# Altium footprint library Connectors.PcbLib: 320 footprints (part 10 of 20)
Each footprint in its own frame and in the unit in brackets; x right, y up, seen from the top. Pads: shape width x height; smd on the part's side, far side on the other; paste and mask are expansions set on the pad; w line width, h text height; cw(c..) or ccw(c..) is an arc to the next point about the centre after c.
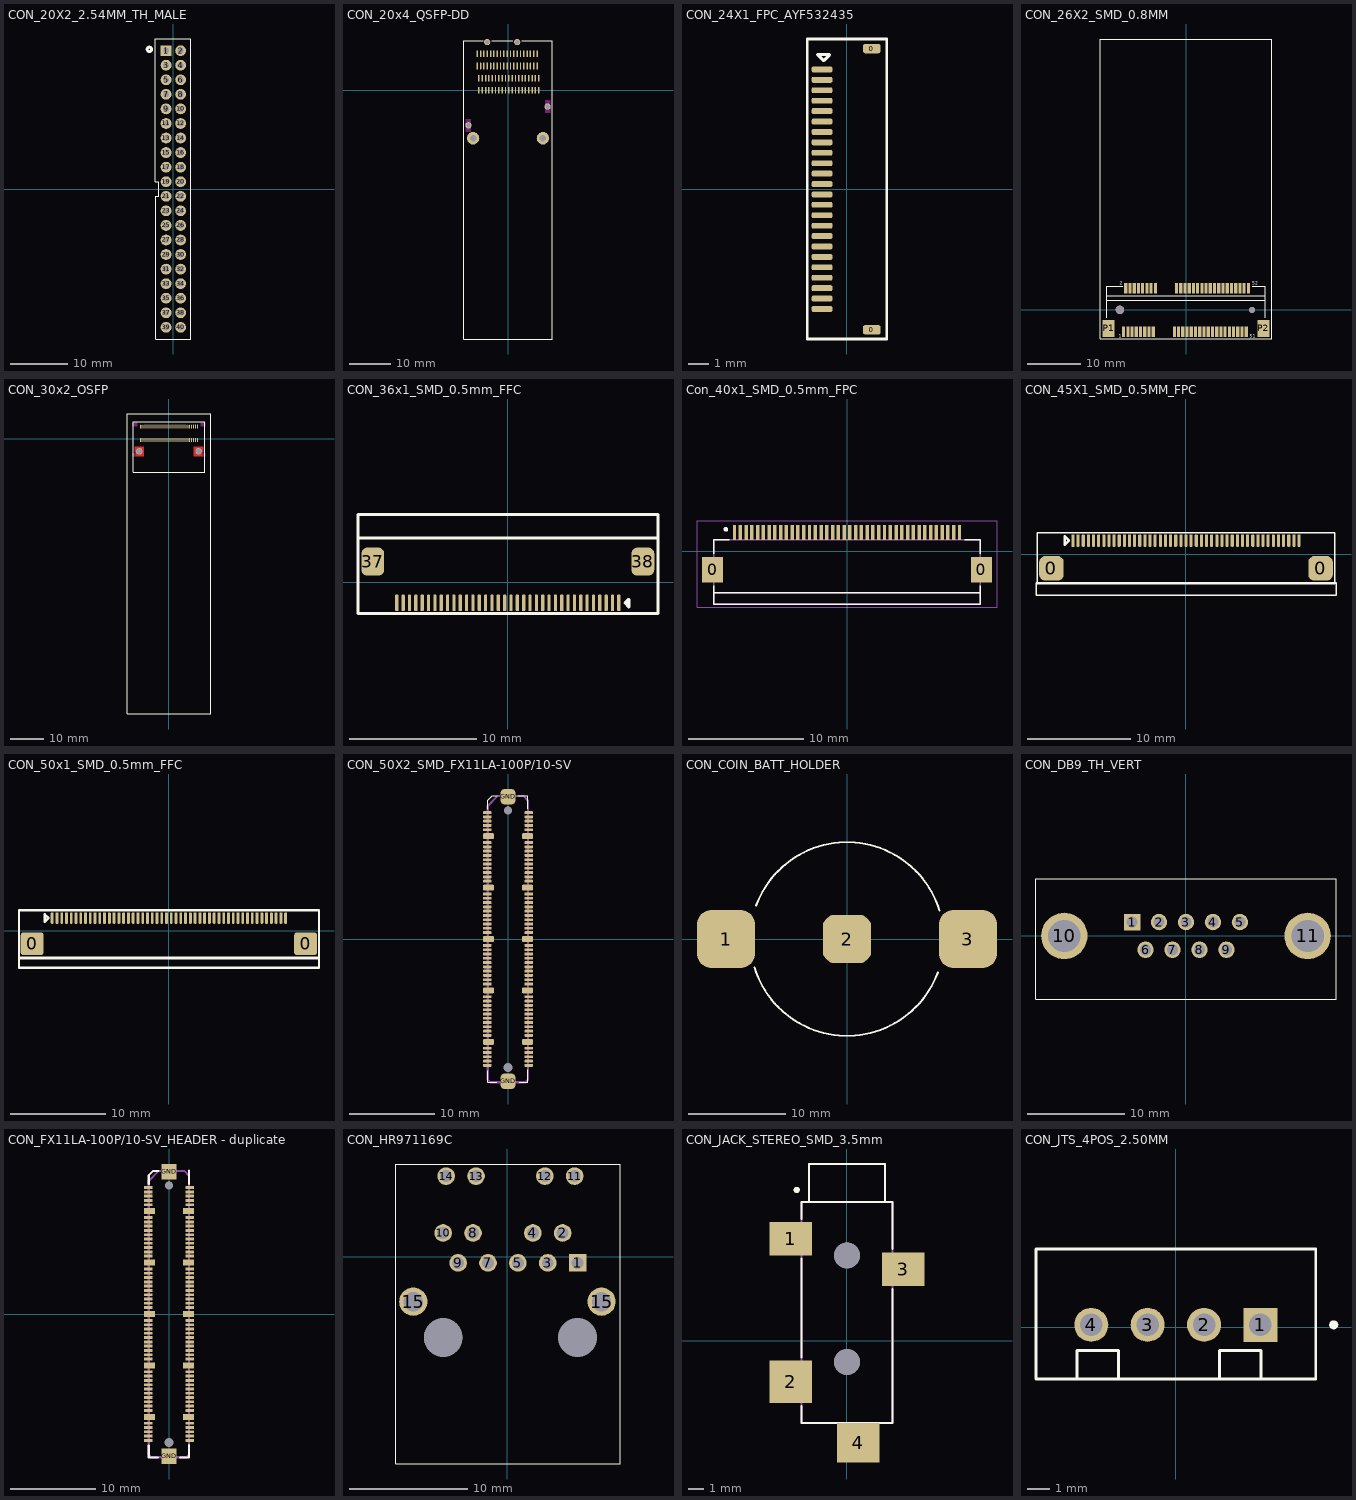
[diagram p9: the footprints below, top view; thin cyan lines are the x and y axes]

## CON_20X2_2.54MM_TH_MALE [mil] "/20230220/N-A.Potosi"
pads (40):
  rect 74x74 hole 40: 1(-50,950)
  round 74 / inner round 0 / far side round 74 hole 40: 2(50,950) 3(-50,850) 4(50,850) 5(-50,750) 6(50,750) 7(-50,650) 8(50,650) 9(-50,550) 10(50,550) 11(-50,450) 12(50,450) 13(-50,350) 14(50,350) 15(-50,250) 16(50,250) 17(-50,150) 18(50,150) 19(-50,50) 20(50,50) 21(-50,-50) 22(50,-50) 23(-50,-150) 24(50,-150) 25(-50,-250) 26(50,-250) 27(-50,-350) 28(50,-350) 29(-50,-450) 30(50,-450) 31(-50,-550) 32(50,-550) 33(-50,-650) 34(50,-650) 35(-50,-750) 36(50,-750) 37(-50,-850) 38(50,-850) 39(-50,-950) 40(50,-950)
Top Overlay:
  circle w20: c-164.54,958.83 r15
  lines w5: -125,50 -100,50 -100,-50 -120,-50 -120,-1030 120,-1030 120,1030 -125,1030 -125,50
Bottom Overlay:
  circle w20: c-164.54,958.83 r15
3D body "20X2HDR61204021621_Download_STP_61204021621_rev1.stp": height 351.38, standoff -125, extent -174.22,-1150.79 187,1150.78

## CON_20x4_QSFP-DD [mm] "/20220601/V-A.Patino"
pads (82):
  rrect50% 0.35x1.6 smd: 1(-7,-0.05) 2(-6.2,-0.05) 3(-5.4,-0.05) 4(-4.6,-0.05) 5(-3.8,-0.05) 6(-3,-0.05) 7(-2.2,-0.05) 8(-1.4,-0.05) 9(-0.6,-0.05) 10(0.2,-0.05) 11(1,-0.05) 12(1.8,-0.05) 13(2.6,-0.05) 14(3.4,-0.05) 15(4.2,-0.05) 16(5,-0.05) 17(5.8,-0.05) 18(6.6,-0.05) 19(7.4,-0.05) 20(7,8.74) 21(6.2,8.74) 22(5.4,8.74) 23(4.6,8.74) 24(3.8,8.74) 25(3,8.74) 26(2.2,8.74) 27(1.4,8.74) 28(0.6,8.74) 29(-0.2,8.74) 30(-1,8.74) 31(-1.8,8.74) 32(-2.6,8.74) 33(-3.4,8.74) 34(-4.2,8.74) 35(-5,8.74) 36(-5.8,8.74) 37(-6.6,8.74) 38(-7.4,8.74) 39(-7,2.88) 40(-6.2,2.88) 41(-5.4,2.88) 42(-4.6,2.88) 43(-3.8,2.88) 44(-3,2.88) 45(-2.2,2.88) 46(-1.4,2.88) 47(-0.6,2.88) 48(0.2,2.88) 49(1,2.88) 50(1.8,2.88) 51(2.6,2.88) 52(3.4,2.88) 53(4.2,2.88) 54(5,2.88) 55(5.8,2.88) 56(6.6,2.88) 57(7.4,2.88) 58(7,5.81) 59(6.2,5.81) 60(5.4,5.81) 61(4.6,5.81) 62(3.8,5.81) 63(3,5.81) 64(2.2,5.81) 65(1.4,5.81) 66(0.6,5.81) 67(-0.2,5.81) 68(-1,5.81) 69(-1.8,5.81) 70(-2.6,5.81) 71(-3.4,5.81) 72(-4.2,5.81) 73(-5,5.81) 74(-5.8,5.81) 75(-6.6,5.81) 76(-7.4,5.81)
  round 1.5 hole 1.05: ""(-9.5,-8.45) ""(-5,11.55) ""(2.2,11.55) ""(9.5,-3.95)
  round 3 hole 1.55 unplated: ""(-8.4,-11.55) ""(8.4,-11.55)
Top Overlay:
  lines w0.127: -5.975,11.9 -10.6,11.9 -10.6,-59.8 10.6,-59.8 10.6,11.9 3.312,11.9 ; -3.888,11.9 1.087,11.9
Keep-Out Layer:
  region: 10.1,-5.45 10.1,-2.45 8.9,-2.45 8.9,-5.45
  region: -10.1,-9.95 -10.1,-6.95 -8.9,-6.95 -8.9,-9.95
3D body "M-UE36-A1070-X000T_REVTF.STEP": height 7.91, standoff -0.94, extent -9.4,-13.975 9.4,9.975
3D body "c-2342933-1-b-3d.stp": height 12.7, standoff -2.34, extent -10.601,-59.765 10.601,11.9

## CON_24X1_FPC_AYF532435 [mil] "/20200625/N-A.Potosi"
pads (26):
  rrect50% 33.46x17.72 smd: 0(47.03,-265.75) 0(47.03,265.75)
  rrect50% 39x11 smd: 1(-47.03,226.38) 2(-47.03,206.69) 3(-47.03,187.01) 4(-47.03,167.32) 5(-47.03,147.64) 6(-47.03,127.95) 7(-47.03,108.27) 8(-47.03,88.58) 9(-47.03,68.9) 10(-47.03,49.21) 11(-47.03,29.53) 12(-47.03,9.84) 13(-47.03,-9.84) 14(-47.03,-29.53) 15(-47.03,-49.21) 16(-47.03,-68.9) 17(-47.03,-88.58) 18(-47.03,-108.27) 19(-47.03,-127.95) 20(-47.03,-147.64) 21(-47.03,-167.32) 22(-47.03,-187.01) 23(-47.03,-206.69) 24(-47.03,-226.38)
Top Overlay:
  lines w5: -74.7,-283.1 -74.7,283.92 75.02,283.92 75.02,-283.1 -74.7,-283.1
  lines w6: -55.39,254.43 -32.76,254.43 -44.07,243.11 -55.39,254.43
3D body "ayf532435-closed.step": height 39.87, standoff 0.5, extent -73.6,-276.57 72.07,274.61

## CON_26X2_SMD_0.8MM [mm] "/20210224/J-E.Pachon"
pads (56):
  rect 0.6x2 smd: 1(-11.8,-4.1) 2(-11.4,4.1) 3(-11,-4.1) 4(-10.6,4.1) 5(-10.2,-4.1) 6(-9.8,4.1) 7(-9.4,-4.1) 8(-9,4.1) 9(-8.6,-4.1) 10(-8.2,4.1) 11(-7.8,-4.1) 12(-7.4,4.1) 13(-7,-4.1) 14(-6.6,4.1) 15(-6.2,-4.1) 16(-5.8,4.1) 17(-2.2,-4.1) 18(-1.8,4.1) 19(-1.4,-4.1) 20(-1,4.1) 21(-0.6,-4.1) 22(-0.2,4.1) 23(0.2,-4.1) 24(0.6,4.1) 25(1,-4.1) 26(1.4,4.1) 27(1.8,-4.1) 28(2.2,4.1) 29(2.6,-4.1) 30(3,4.1) 31(3.4,-4.1) 32(3.8,4.1) 33(4.2,-4.1) 34(4.6,4.1) 35(5,-4.1) 36(5.4,4.1) 37(5.8,-4.1) 38(6.2,4.1) 39(6.6,-4.1) 40(7,4.1) 41(7.4,-4.1) 42(7.8,4.1) 43(8.2,-4.1) 44(8.6,4.1) 45(9,-4.1) 46(9.4,4.1) 47(9.8,-4.1) 48(10.2,4.1) 49(10.6,-4.1) 50(11,4.1) 51(11.4,-4.1) 52(11.8,4.1)
  rect 2.3x3.2 smd: P1(-14.65,-3.5) P2(14.65,-3.5)
  round 1.6 hole 1.6 unplated: ""(-12.5,0)
  round 1.1 hole 1.1 unplated: ""(12.5,0)
Top Overlay:
  lines w0.127: -16.252,-5.503 16.248,-5.503 16.248,51.247 -16.252,51.247 -16.252,-5.503
  lines w0.2: -15,-1.5 -15,4.5 -12,4.5 ; -15,1.86 15,1.86 ; -15,2.71 15,2.71 ; 12.5,4.5 15,4.5 15,-1.5
  text "1" at -12.752,-5.251 h0.61
  text "51" at 12.013,-5.256 h0.61
  text "52" at 12.518,4.757 h0.61
  text "2" at -12.519,4.757 h0.61
3D body "1775862-2.stp": height 5.16, standoff -0.69, extent -14.95,-4.57 14.95,4.51

## CON_30x2_OSFP [mm] "/20220602/V-A.Patino"
pads (62):
  rrect50% 0.3x1.2 smd: 1(-8.7,-0.275) 2(-8.1,-0.275) 3(-7.5,-0.275) 4(-6.9,-0.275) 5(-6.3,-0.275) 6(-5.7,-0.275) 7(-5.1,-0.275) 8(-4.5,-0.275) 9(-3.9,-0.275) 10(-3.3,-0.275) 11(-2.7,-0.275) 12(-2.1,-0.275) 13(-1.5,-0.275) 14(-0.9,-0.275) 15(-0.3,-0.275) 16(0.3,-0.275) 17(0.9,-0.275) 18(1.5,-0.275) 19(2.1,-0.275) 20(2.7,-0.275) 21(3.3,-0.275) 22(3.9,-0.275) 23(4.5,-0.275) 24(5.1,-0.275) 25(5.7,-0.275) 26(6.3,-0.275) 27(6.9,-0.275) 28(7.5,-0.275) 29(8.1,-0.275) 30(8.7,-0.275) 31(8.7,3.725) 32(8.1,3.725) 33(7.5,3.725) 34(6.9,3.725) 35(6.3,3.725) 36(5.7,3.725) 37(5.1,3.725) 38(4.5,3.725) 39(3.9,3.725) 40(3.3,3.725) 41(2.7,3.725) 42(2.1,3.725) 43(1.5,3.725) 44(0.9,3.725) 45(0.3,3.725) 46(-0.3,3.725) 47(-0.9,3.725) 48(-1.5,3.725) 49(-2.1,3.725) 50(-2.7,3.725) 51(-3.3,3.725) 52(-3.9,3.725) 53(-4.5,3.725) 54(-5.1,3.725) 55(-5.7,3.725) 56(-6.3,3.725) 57(-6.9,3.725) 58(-7.5,3.725) 59(-8.1,3.725) 60(-8.7,3.725)
  round 1.9 hole 1.651 unplated: ""(-9,-3.725) ""(9,-3.725)
Top Layer:
  region: 10.425,-2.395 7.575,-2.395 7.575,-5.245 10.025,-5.245 10.025,-4.266 10.032,-4.259 10.035,-4.227 10.06,-4.168 10.105,-4.123 10.164,-4.098 10.196,-4.095 10.425,-4.095
  region: -10.425,-2.395 -7.575,-2.395 -7.575,-5.245 -10.025,-5.245 -10.025,-4.266 -10.032,-4.259 -10.035,-4.227 -10.06,-4.168 -10.105,-4.123 -10.164,-4.098 -10.196,-4.095 -10.425,-4.095
Top Overlay:
  lines w0.152: -12.6,-83.372 -12.6,7.572 12.628,7.572 12.628,-83.372 -12.6,-83.372 ; -10.8,-10.075 -10.8,5.185 10.8,5.185 10.8,-10.075 -10.8,-10.075
Keep-Out Layer:
  rectangle: 9.52,3.735 11.03,4.935
  rectangle: 10.125,-5.315 11.025,-4.215
  rectangle: -11.025,-5.315 -10.125,-4.215
  rectangle: -11.03,3.735 -9.52,4.935
3D body "M-UE62-B1620-02021-REVT1.STEP": height 15.56, standoff -2.24, extent -12.633,-83.42 12.633,7.58
3D body "c-2324869-2-1-3d.stp": height 8.41, standoff -1.04, extent -10.8,-10.075 10.8,5.185

## CON_36x1_SMD_0.5mm_FFC [mil] "/ 20220629/ F-A.Ospina"
height 78.74
pads (38):
  rrect50% 10x51 smd: 1(344.49,-64) 2(324.8,-64) 3(305.12,-64) 4(285.43,-64) 5(265.75,-64) 6(246.06,-64) 7(226.38,-64) 8(206.69,-64) 9(187.01,-64) 10(167.32,-64) 11(147.64,-64) 12(127.95,-64) 13(108.27,-64) 14(88.58,-64) 15(68.9,-64) 16(49.21,-64) 17(29.53,-64) 18(9.84,-64) 19(-9.84,-64) 20(-29.53,-64) 21(-49.21,-64) 22(-68.9,-64) 23(-88.58,-64) 24(-108.27,-64) 25(-127.95,-64) 26(-147.64,-64) 27(-167.32,-64) 28(-187.01,-64) 29(-206.69,-64) 30(-226.38,-64) 31(-246.06,-64) 32(-265.75,-64) 33(-285.43,-64) 34(-305.12,-64) 35(-324.8,-64)
  rrect50% 10x50.98 smd: 36(-344.49,-64)
  rrect50% 71x87 smd: 37(-419,64) 38(419,64)
Top Overlay:
  lines w10: -464.93,137.06 -227.36,137.06 ; -230.52,137.06 234.24,137.01 466.03,137.01 ; -464.93,-96.88 465.77,-96.88 465.77,210.2 -464.93,210.2 -464.93,-96.88 ; 363.62,-64.13 375.43,-53.46 375.43,-76.45 363.62,-64.13
3D body "FH12A-36S-0.5SH.stp": height 79.53, standoff -5.42, extent -443.4,-76.47 442.46,199.12

## Con_40x1_SMD_0.5mm_FPC [mm] "/20230904/J-E.Pachon"
pads (42):
  rect 1.8x2.2 smd: 0(-11.65,-1.625) 0(11.65,-1.625)
  rect 0.3x1.3 smd: 1(-9.75,1.625) 2(-9.25,1.625) 3(-8.75,1.625) 4(-8.25,1.625) 5(-7.75,1.625) 6(-7.25,1.625) 7(-6.75,1.625) 8(-6.25,1.625) 9(-5.75,1.625) 10(-5.25,1.625) 11(-4.75,1.625) 12(-4.25,1.625) 13(-3.75,1.625) 14(-3.25,1.625) 15(-2.75,1.625) 16(-2.25,1.625) 17(-1.75,1.625) 18(-1.25,1.625) 19(-0.75,1.625) 20(-0.25,1.625) 21(0.25,1.625) 22(0.75,1.625) 23(1.25,1.625) 24(1.75,1.625) 25(2.25,1.625) 26(2.75,1.625) 27(3.25,1.625) 28(3.75,1.625) 29(4.25,1.625) 30(4.75,1.625) 31(5.25,1.625) 32(5.75,1.625) 33(6.25,1.625) 34(6.75,1.625) 35(7.25,1.625) 36(7.75,1.625) 37(8.25,1.625) 38(8.75,1.625) 39(9.25,1.625) 40(9.75,1.625)
Top Overlay:
  circle w0.2: c-10.5,1.875 r0.1
  lines w0.127: -11.55,-3.025 -11.55,-3.625 ; -11.55,-0.225 -11.55,0.975 -10.2,0.975 ; 10.2,0.975 11.55,0.975 11.55,-0.225 ; 11.55,-3.025 11.55,-3.625 ; -11.55,-3.625 -11.55,-4.625 11.55,-4.625 11.55,-3.625 ; -11.55,-3.625 11.55,-3.625
Top 3D Body (Mech13):
  lines w0.127: -11.55,-3.625 -11.55,-4.625 11.55,-4.625 11.55,-3.625 ; -11.55,-3.625 -11.55,0.975 11.55,0.975 11.55,-3.625 ; -11.55,-3.625 11.55,-3.625
Mechanical 15:
  lines w0.05: -13,-4.875 13,-4.875 13,2.625 -13,2.625 -13,-4.875
3D body "step_temp.STEP": height 2.2, standoff 0, extent -12.05,-4.625 12.05,1.775

## CON_45X1_SMD_0.5MM_FPC [mm] "/ 20200724 / N-A.Potosi"
pads (47):
  rrect50% 2.4x2.4 smd: 0(-13.1,-1.35) 0(13.1,-1.35)
  rect 0.3x1.2 smd: 1(-11,1.35)
  rrect50% 0.3x1.2 smd: 2(-10.5,1.35) 3(-10,1.35) 4(-9.5,1.35) 5(-9,1.35) 6(-8.5,1.35) 7(-8,1.35) 8(-7.5,1.35) 9(-7,1.35) 10(-6.5,1.35) 11(-6,1.35) 12(-5.5,1.35) 13(-5,1.35) 14(-4.5,1.35) 15(-4,1.35) 16(-3.5,1.35) 17(-3,1.35) 18(-2.5,1.35) 19(-2,1.35) 20(-1.5,1.35) 21(-1,1.35) 22(-0.5,1.35) 23(0,1.35) 24(0.5,1.35) 25(1,1.35) 26(1.5,1.35) 27(2,1.35) 28(2.5,1.35) 29(3,1.35) 30(3.5,1.35) 31(4,1.35) 32(4.5,1.35) 33(5,1.35) 34(5.5,1.35) 35(6,1.35) 36(6.5,1.35) 37(7,1.35) 38(7.5,1.35) 39(8,1.35) 40(8.5,1.35) 41(9,1.35) 42(9.5,1.35) 43(10,1.35) 44(10.5,1.35) 45(11,1.35)
Top Overlay:
  lines w0.127: -14.6,-3.95 -14.6,-2.75 14.6,-2.75 14.6,-3.95 -14.6,-3.95 ; -14.5,-2.84 -14.5,2.094 14.5,2.094 14.5,-2.84 -14.5,-2.84
  lines w0.254: -11.8,0.95 -11.4,1.35 -11.8,1.75 -11.8,0.95
3D body "s62684_451100alf.stp": height 2.11, standoff 0.05, extent -14,-3.97 14,1.67

## CON_50x1_SMD_0.5mm_FFC [mm] "/ 20200923 / V-A.Patino"
height 2
pads (52):
  rrect25% 2.4x2.4 smd: 0(-14.35,-1.35) 0(14.35,-1.35)
  rrect50% 0.3x1.2 smd mask+0.05: 1(-12.25,1.35) 2(-11.75,1.35) 3(-11.25,1.35) 4(-10.75,1.35) 5(-10.25,1.35) 6(-9.75,1.35) 7(-9.25,1.35) 8(-8.75,1.35) 9(-8.25,1.35) 10(-7.75,1.35) 11(-7.25,1.35) 12(-6.75,1.35) 13(-6.25,1.35) 14(-5.75,1.35) 15(-5.25,1.35) 16(-4.75,1.35) 17(-4.25,1.35) 18(-3.75,1.35) 19(-3.25,1.35) 20(-2.75,1.35) 21(-2.25,1.35) 22(-1.75,1.35) 23(-1.25,1.35) 24(-0.75,1.35) 25(-0.25,1.35) 26(0.25,1.35) 27(0.75,1.35) 28(1.25,1.35) 29(1.75,1.35) 30(2.25,1.35) 31(2.75,1.35) 32(3.25,1.35) 33(3.75,1.35) 34(4.25,1.35) 35(4.75,1.35) 36(5.25,1.35) 37(5.75,1.35) 38(6.25,1.35) 39(6.75,1.35) 40(7.25,1.35) 41(7.75,1.35) 42(8.25,1.35) 43(8.75,1.35) 44(9.25,1.35) 45(9.75,1.35) 46(10.25,1.35) 47(10.75,1.35) 48(11.25,1.35) 49(11.75,1.35) 50(12.25,1.35)
Top Overlay:
  lines w0.254: -15.73,-3.85 15.75,-3.85 15.75,-2.79 -15.73,-2.79 -15.73,-3.85 ; -15.73,-2.89 15.75,-2.89 15.75,2.15 -15.73,2.15 -15.73,-2.89 ; -13.05,0.95 -13.05,1.75 -12.65,1.35 -13.05,0.95
3D body "62684502100alf.stp": height 2, standoff -0.05, extent -15.24,-4.12 15.26,1.48

## CON_50X2_SMD_FX11LA-100P/10-SV [mm] "Hirose Conn/20200714/N-A.Potosi"
pads (114):
  rrect50% 1x0.33 smd: A1(-2.425,14.749) A2(-2.425,14.249) A3(-2.425,13.749) A4(-2.425,13.249) A5(-2.425,12.749) A6(-2.425,11.249) A7(-2.425,10.749) A8(-2.425,10.249) A9(-2.425,9.749) A10(-2.425,9.249) A11(-2.425,8.749) A12(-2.425,8.25) A13(-2.425,7.75) A14(-2.425,7.25) A15(-2.425,6.75) A16(-2.425,5.25) A17(-2.425,4.75) A18(-2.425,4.25) A19(-2.425,3.75) A20(-2.425,3.25) A21(-2.425,2.75) A22(-2.425,2.251) A23(-2.425,1.751) A24(-2.425,1.251) A25(-2.425,0.751) A26(-2.425,-0.749) A27(-2.425,-1.249) A28(-2.425,-1.749) A29(-2.425,-2.249) A30(-2.425,-2.749) A31(-2.425,-3.249) A32(-2.425,-3.748) A33(-2.425,-4.248) A34(-2.425,-4.748) A35(-2.425,-5.248) A36(-2.425,-6.747) A37(-2.425,-7.247) A38(-2.425,-7.747) A39(-2.425,-8.247) A40(-2.425,-8.747) A41(-2.425,-9.247) A42(-2.425,-9.747) A43(-2.425,-10.247) A44(-2.425,-10.747) A45(-2.425,-11.247) A46(-2.425,-12.747) A47(-2.425,-13.247) A48(-2.425,-13.747) A49(-2.425,-14.247) A50(-2.425,-14.747) B1(2.425,14.749) B2(2.425,14.249) B3(2.425,13.749) B4(2.425,13.249) B5(2.425,12.749) B6(2.425,11.249) B7(2.425,10.749) B8(2.425,10.249) B9(2.425,9.749) B10(2.425,9.249) B11(2.425,8.749) B12(2.425,8.25) B13(2.425,7.75) B14(2.425,7.25) B15(2.425,6.75) B16(2.425,5.251) B17(2.425,4.751) B18(2.425,4.251) B19(2.425,3.751) B20(2.425,3.251) B21(2.425,2.751) B22(2.425,2.251) B23(2.425,1.751) B24(2.425,1.251) B25(2.425,0.751) B26(2.425,-0.748) B27(2.425,-1.248) B28(2.425,-1.748) B29(2.425,-2.248) B30(2.425,-2.748) B31(2.425,-3.248) B32(2.425,-3.748) B33(2.425,-4.248) B34(2.425,-4.748) B35(2.425,-5.248) B36(2.425,-6.747) B37(2.425,-7.247) B38(2.425,-7.747) B39(2.425,-8.247) B40(2.425,-8.747) B41(2.425,-9.247) B42(2.425,-9.747) B43(2.425,-10.247) B44(2.425,-10.747) B45(2.425,-11.247) B46(2.425,-12.747) B47(2.425,-13.247) B48(2.425,-13.747) B49(2.425,-14.247) B50(2.425,-14.747)
  rrect50% 1.3x0.7 smd: GND(-2.275,-11.997) GND(-2.275,-5.998) GND(-2.275,0.001) GND(-2.275,6) GND(-2.275,11.999) GND(2.275,-11.996) GND(2.275,-5.998) GND(2.275,0.001) GND(2.275,6) GND(2.275,11.999)
  rrect50% 1.7x1.8 smd: GND(0,-16.601) GND(0,16.601)
  round 0.9 hole 1 unplated: ""(0,-14.997)
  round 0.9 hole 0.95 unplated: ""(0,14.999)
Top Overlay:
  lines w0.127: -2.365,-15.35 -2.365,-16.734 -1.29,-16.734 ; -2.365,15.156 -2.365,16.17 -1.835,16.7 -1.245,16.7 ; 1.13,16.709 2.322,16.709 2.322,15.17 ; 1.301,-16.734 2.322,-16.734 2.322,-15.272
Mechanical 1:
  lines w0.251: -2.366,-16.408 -2.366,15.517 -1.183,16.7 1.782,16.7 2.318,16.164 2.318,-16.444 2.04,-16.722 -2.052,-16.722 -2.366,-16.408
3D body "47879.stp": height 1.65, standoff -0.58, extent -2.495,-17.295 2.755,17.305

## CON_COIN_BATT_HOLDER [mm] "/20201001/N-A.Potosi"
pads (3):
  rrect50% 6x6 smd: 1(-12.5,0) 3(12.5,0)
  rrect50% 5x5 smd: 2(0,0)
Top Overlay:
  lines w0.203: -9.565,-2.918 ccw(c0,0) 9.391,-3.437 ; -9.391,3.437 cw(c0,0) 9.565,2.918
3D body "CR2032_closed_battery_BH.step": height 3.97, standoff 0.11, extent -11.625,-10.257 11.625,9.743

## CON_DB9_TH_VERT [mm] "/20220603/F-A.Ospina"
pads (11):
  rect 1.69x1.69 hole 1.143: 1(-5.54,1.42)
  round 1.69 hole 1.143: 2(-2.77,1.42) 3(0,1.42) 4(2.77,1.42) 5(5.54,1.42) 6(-4.155,-1.42) 7(-1.385,-1.42) 8(1.385,-1.42) 9(4.155,-1.42)
  round 4.76 hole 3.302: 10(-12.495,0) 11(12.495,0)
Top Overlay:
  lines w0.127: -15.4,2.9 -15.4,5.867 15.403,5.867 15.403,2.875 15.403,-6.497 15.4,-6.5 -15.4,-6.5 -15.4,2.933
Bottom Overlay:
  text "6" at -3.9,-3.38 h0.76
  text "7" at -1.13,-3.38 h0.76
  text "8" at 1.64,-3.38 h0.76
  text "9" at 4.41,-3.38 h0.76
  text "4" at 3.075,2.702 h0.76
  text "3" at 0.217,2.702 h0.76
  text "2" at -2.658,2.702 h0.76
  text "1" at -5.483,2.702 h0.76
  text "5" at 5.768,2.702 h0.76
3D body "sd09s24a6gv00lf.stp": height 12.26, standoff -3.19, extent -15.554,-6.296 15.446,6.254

## CON_FX11LA-100P/10-SV_HEADER - duplicate [mm]
pads (114):
  rect 1x0.33 smd: A1(-2.425,14.749) A2(-2.425,14.249) A3(-2.425,13.749) A4(-2.425,13.249) A5(-2.425,12.749) A6(-2.425,11.249) A7(-2.425,10.749) A8(-2.425,10.249) A9(-2.425,9.749) A10(-2.425,9.249) A11(-2.425,8.749) A12(-2.425,8.25) A13(-2.425,7.75) A14(-2.425,7.25) A15(-2.425,6.75) A16(-2.425,5.25) A17(-2.425,4.75) A18(-2.425,4.25) A19(-2.425,3.75) A20(-2.425,3.25) A21(-2.425,2.75) A22(-2.425,2.251) A23(-2.425,1.751) A24(-2.425,1.251) A25(-2.425,0.751) A26(-2.425,-0.749) A27(-2.425,-1.249) A28(-2.425,-1.749) A29(-2.425,-2.249) A30(-2.425,-2.749) A31(-2.425,-3.249) A32(-2.425,-3.748) A33(-2.425,-4.248) A34(-2.425,-4.748) A35(-2.425,-5.248) A36(-2.425,-6.747) A37(-2.425,-7.247) A38(-2.425,-7.747) A39(-2.425,-8.247) A40(-2.425,-8.747) A41(-2.425,-9.247) A42(-2.425,-9.747) A43(-2.425,-10.247) A44(-2.425,-10.747) A45(-2.425,-11.247) A46(-2.425,-12.747) A47(-2.425,-13.247) A48(-2.425,-13.747) A49(-2.425,-14.247) A50(-2.425,-14.747) B1(2.425,14.749) B2(2.425,14.249) B3(2.425,13.749) B4(2.425,13.249) B5(2.425,12.749) B6(2.425,11.249) B7(2.425,10.749) B8(2.425,10.249) B9(2.425,9.749) B10(2.425,9.249) B11(2.425,8.749) B12(2.425,8.25) B13(2.425,7.75) B14(2.425,7.25) B15(2.425,6.75) B16(2.425,5.251) B17(2.425,4.751) B18(2.425,4.251) B19(2.425,3.751) B20(2.425,3.251) B21(2.425,2.751) B22(2.425,2.251) B23(2.425,1.751) B24(2.425,1.251) B25(2.425,0.751) B26(2.425,-0.748) B27(2.425,-1.248) B28(2.425,-1.748) B29(2.425,-2.248) B30(2.425,-2.748) B31(2.425,-3.248) B32(2.425,-3.748) B33(2.425,-4.248) B34(2.425,-4.748) B35(2.425,-5.248) B36(2.425,-6.747) B37(2.425,-7.247) B38(2.425,-7.747) B39(2.425,-8.247) B40(2.425,-8.747) B41(2.425,-9.247) B42(2.425,-9.747) B43(2.425,-10.247) B44(2.425,-10.747) B45(2.425,-11.247) B46(2.425,-12.747) B47(2.425,-13.247) B48(2.425,-13.747) B49(2.425,-14.247) B50(2.425,-14.747)
  rect 1.3x0.7 smd: GND(-2.275,-11.997) GND(-2.275,-5.998) GND(-2.275,0.001) GND(-2.275,6) GND(-2.275,11.999) GND(2.275,-11.996) GND(2.275,-5.998) GND(2.275,0.001) GND(2.275,6) GND(2.275,11.999)
  rect 1.7x1.8 smd: GND(0,-16.601) GND(0,16.601)
  round 0.9 hole 1 unplated: ""(0,-14.997)
  round 0.9 hole 0.95 unplated: ""(0,14.999)
Top Overlay:
  lines w0.251: -2.365,-15.35 -2.365,-16.734 -1.29,-16.734 ; -2.365,15.156 -2.365,16.17 -1.835,16.7 -1.245,16.7 ; 1.301,-16.734 2.322,-16.734 2.322,-15.272 ; 2.322,15.17 2.322,16.752
Mechanical 1:
  lines w0.251: -2.366,-16.408 -2.366,15.517 -1.183,16.7 1.782,16.7 2.318,16.164 2.318,-16.444 2.04,-16.722 -2.052,-16.722 -2.366,-16.408
3D body "47879.stp": height 1.65, standoff -0.58, extent -2.495,-17.295 2.755,17.305

## CON_HR971169C [mm] "20220607 / E.Naranjo"
pads (17):
  rect 1.5x1.5 hole 1.016: 1(5.97,-0.51)
  round 1.5 hole 1.016: 2(4.7,2.03) 3(3.43,-0.51) 4(2.16,2.03) 5(0.89,-0.51) 7(-1.65,-0.51) 8(-2.92,2.03) 9(-4.19,-0.51) 10(-5.46,2.03) 11(5.72,6.86) 12(3.18,6.86) 13(-2.667,6.86) 14(-5.21,6.86)
  round 2.4 hole 1.651: 15(-8,-3.81) 15(8,-3.81)
  round 3.25 hole 3.302 unplated: ""(-5.46,-6.86) ""(5.97,-6.86)
Top Overlay:
  lines w0.1: -9.5,-17.61 -9.5,7.89 9.6,7.89 9.6,-17.61 -9.5,-17.61
3D body: height 15.21, standoff 0, extent -8.92,-17.61 8.86,7.84

## CON_JACK_STEREO_SMD_3.5mm [mm] "/ 20200727/ M-C.Calderon"
pads (6):
  rect 2.8x2.2 smd: 1(-3.7,6.7) 3(3.7,4.7)
  rect 2.8x2.8 smd: 2(-3.7,-2.7)
  rect 2.8x2.6 smd: 4(0.75,-6.7)
  round 1.7 hole 1.7 unplated: ""(0,-1.4) ""(0,5.6)
Top Overlay:
  circle w0.2: c-3.3,9.9 r0.1
  lines w0.127: -3,-4.3 -3,-5.4 3,-5.4 3,3.4 ; -3,-1.1 -3,5.4 ; -3,8 -3,9.1 -2.5,9.1 ; 3,6 3,9.1 2.5,9.1 ; -2.5,9.1 -2.5,11.6 2.5,11.6 2.5,9.1 ; -2.5,9.1 2.5,9.1
Mechanical 4:
  circle w0.2: c-3.3,9.9 r0.1
  circle w0.2: c-3.3,9.9 r0.1
  lines w0.127: -3,-5.4 -3,9.1 ; -3,-5.4 3,-5.4 ; -3,-5.4 -3,9.1 ; -3,-5.4 3,-5.4 ; -3,9.1 3,9.1 ; -3,9.1 3,9.1 ; -2.5,11.6 -2.5,9.1 -2.5,11.6 ; -2.5,11.6 2.5,11.6 ; -2.5,11.6 2.5,11.6 ; 2.5,11.6 2.5,9.1 2.5,11.6 ; 3,-5.4 3,9.1 ; 3,-5.4 3,9.1
3D body "User Library-Audio jack 4.step": height 5.11, standoff -0.69, extent -4.506,-6.7 4.506,11.9

## CON_JTS_4POS_2.50MM [mm] "20240529/ J.Jaramillo"
pads (4):
  rect 1.508x1.508 / inner round 1.508 / far side rect 1.508x1.508 hole 1: 1(3.75,0.11)
  round 1.508 hole 1: 2(1.25,0.11) 3(-1.25,0.11) 4(-3.75,0.11)
Top Overlay:
  circle w0.2: c7,0.11 r0.1
  lines w0.127: -4.386,-2.286 -4.386,-1.044 -4.376,-1.033 -2.54,-1.033 -2.54,-2.286 ; 1.929,-2.286 1.929,-1.044 ; 1.94,-1.033 3.775,-1.033 3.775,-2.286 ; -6.2,-2.286 -6.2,3.464 6.2,3.464 6.2,-2.286 -6.2,-2.286
3D body "B4B-XH-A.STEP": height 7, standoff -3.4, extent -6.2,-2.286 6.2,3.464